# Altium schematic symbol library SFH615A-2.SchLib: 1 symbol
Pins are listed as number, name and electrical type; pins without a type are passive.

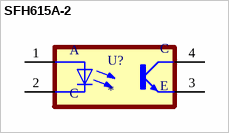
[diagram p0: symbol SFH615A-2]

## SFH615A-2
designator U?
Optocoupler, 1.25 V (Typ.), 60 mA (Max.), 5300 V (RMS) (Max.), 100 mW (Max.) | Vishay / Small Signal & Opto Products (SSP) SFH615A-2; MF: Vishay Semiconductor; SnapEDA_Link: https://www.snapeda.com/parts/SFH615A-2/Vishay/view-part/?ref=snap; Package: DIP-4 Vishay; Value: *; MP: SFH615A-2; Check_prices: https://www.snapeda.com/parts/SFH615A-2/Vishay/view-part/?ref=eda
footprint DIP762W50P254L458H480Q4
pins: 1 A, 2 C, 3 E, 4 CO